# Altium schematic symbol library C0805C101JAGAC7800.SchLib: 1 symbol
Pins are listed as number, name and electrical type; pins without a type are passive.

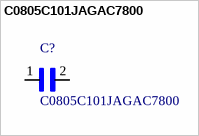
[diagram p0: symbol C0805C101JAGAC7800]

## C0805C101JAGAC7800
designator C?
/ 100pF Â±5% 250V Ceramic Capacitor C0G, NP0 0805 _2012 Metric_ /; MF: KEMET; Digi-Key_Part_Number: 399-15000-1-ND; Package: 0805 KEMET; SnapEDA_Link: https://www.snapeda.com/parts/C0805C101JAGAC7800/KEMET/view-part/3661430/?ref=snap; Digi-Key_Purchase_URL: https://www.digikey.com.tr/product-detail/en/kemet/C0805C101JAGAC7800/399-15000-1-ND/7382549?utm_source=snapeda&utm_medium=aggregator&utm_campaign=symbol; MP: C0805C101JAGAC7800; Value: *
footprint *CAPC2012X88N
pins: 1, 2